# Altium footprint library Package_DFN_QFN.PcbLib: 735 footprints (part 14 of 46)
Each footprint in its own frame and in the unit in brackets; x right, y up, seen from the top. Pads: shape width x height; smd on the part's side, far side on the other; paste and mask are expansions set on the pad; w line width, h text height; cw(c..) or ccw(c..) is an arc to the next point about the centre after c.
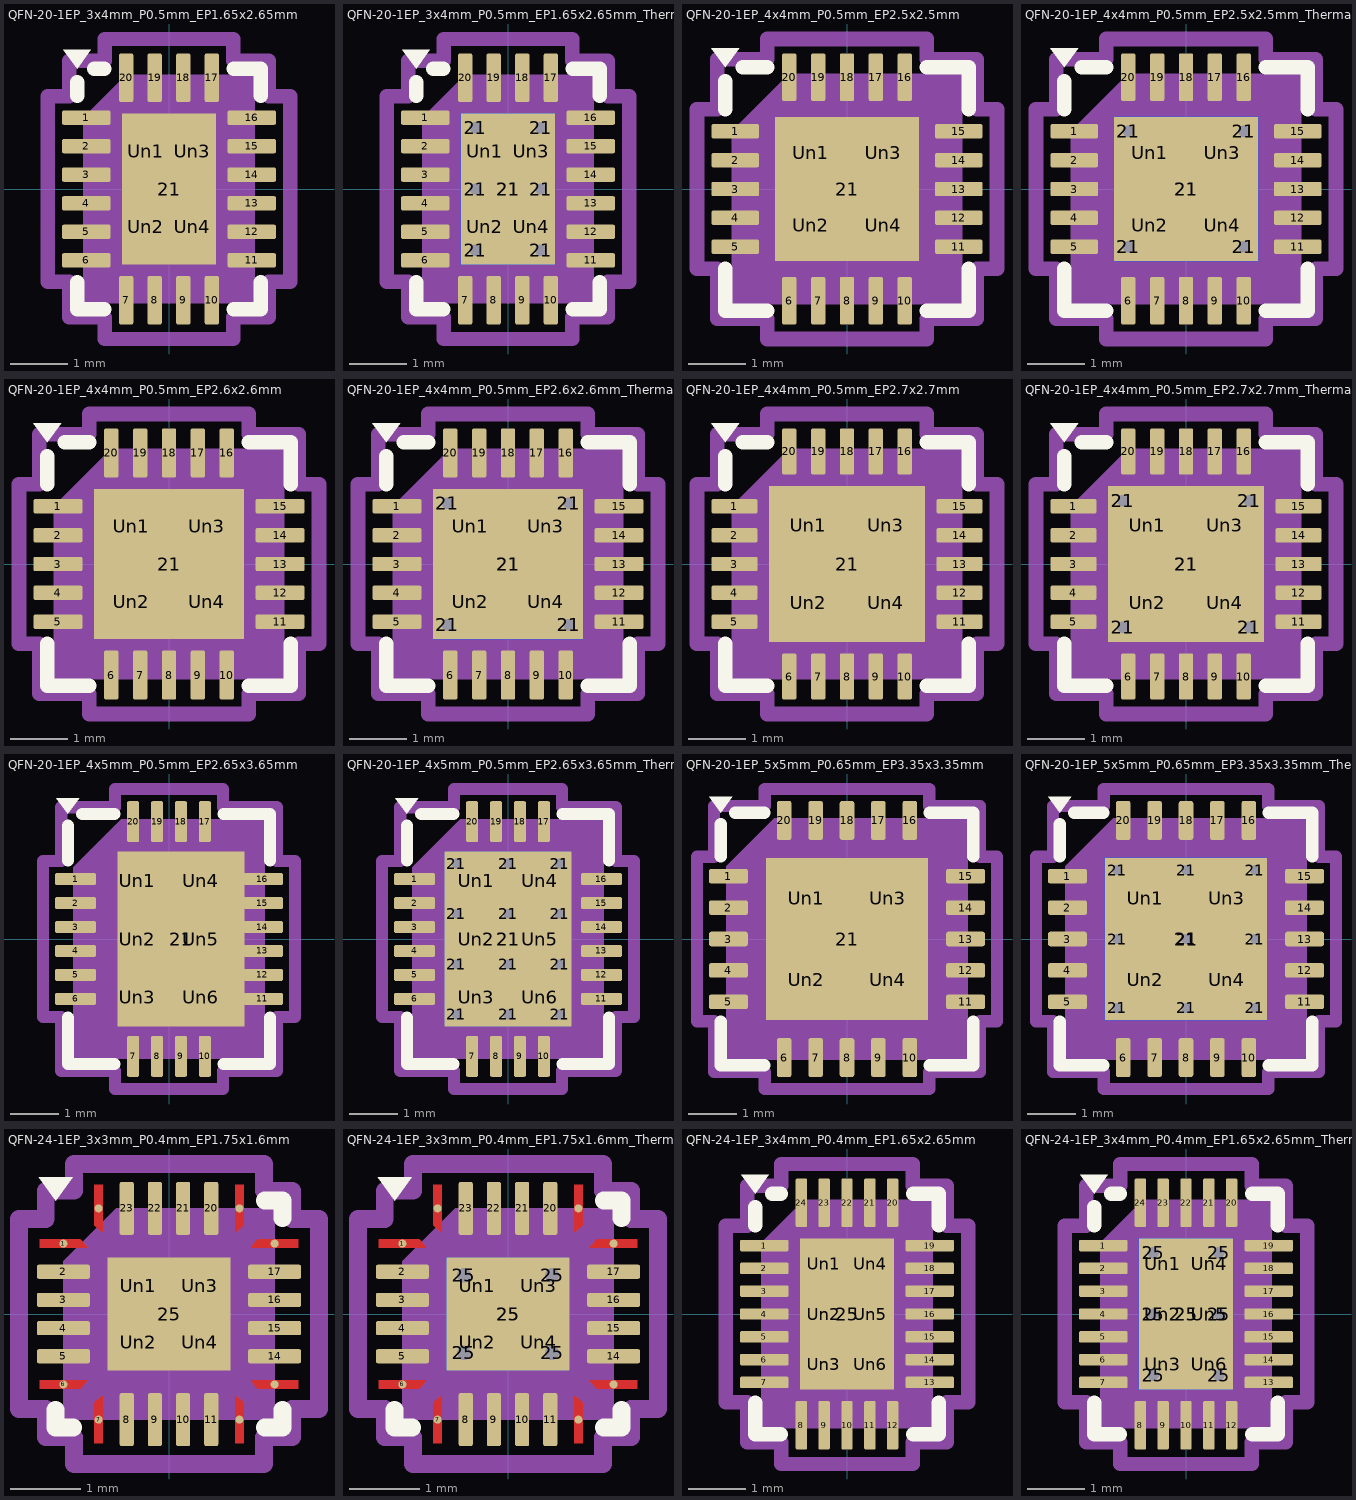
[diagram p13: the footprints below, top view; thin cyan lines are the x and y axes]

## QFN-20-1EP_3x4mm_P0.5mm_EP1.65x2.65mm [mm] "QFN-20-1EP_3x4mm_P0.5mm_EP1.65x2.65mm"
pads (25):
  rrect25% 0.85x0.25 smd: 1(-1.45,1.25) 2(-1.45,0.75) 3(-1.45,0.25) 4(-1.45,-0.25) 5(-1.45,-0.75) 6(-1.45,-1.25) 11(1.45,-1.25) 12(1.45,-0.75) 13(1.45,-0.25) 14(1.45,0.25) 15(1.45,0.75) 16(1.45,1.25)
  rrect25% 0.25x0.85 smd: 7(-0.75,-1.95) 8(-0.25,-1.95) 9(0.25,-1.95) 10(0.75,-1.95) 17(0.75,1.95) 18(0.25,1.95) 19(-0.25,1.95) 20(-0.75,1.95)
  rect 1.65x2.65 smd: 21(0,0)
  rrect25% 0.67x1.07 on Top Paste: Un1(-0.41,0.66) Un2(-0.41,-0.66) Un3(0.41,0.66) Un4(0.41,-0.66)
F.SilkS:
  region: -1.61,2.11 -1.85,2.44 -1.37,2.44
  lines w0.254: -1.61,-1.635 -1.61,-2.11 -1.135,-2.11 ; -1.61,1.635 -1.61,1.87 ; -1.31,2.11 -1.135,2.11 ; 1.135,-2.11 1.61,-2.11 1.61,-1.635 ; 1.135,2.11 1.61,2.11 1.61,1.635
Top Component Center:
  lines w0.127: -0.127,0 0.127,0 -0.127,0 ; 0,-0.127 0,0.127 0,-0.127
Top Assembly:
  region: 1.5,-2 -1.5,-2 -1.5,1.25 -0.75,2 1.5,2
Top Courtyard:
  lines w0.254: -2.13,-1.63 -1.75,-1.63 -1.75,-2.25 -1.13,-2.25 -1.13,-2.63 1.13,-2.63 1.13,-2.25 1.75,-2.25 1.75,-1.63 2.13,-1.63 2.13,1.63 1.75,1.63 1.75,2.25 1.13,2.25 1.13,2.63 -1.13,2.63 -1.13,2.25 -1.75,2.25 -1.75,1.63 -2.13,1.63 -2.13,-1.63
Top Designator:
  text ".Designator" at -3.43,-0.344 h1.52
3D body "QFN-20-1EP_3x4mm_P0.5mm_EP1.65x2.65mm.step": height 0.77, standoff 0, extent -1.5,-2 1.5,2

## QFN-20-1EP_3x4mm_P0.5mm_EP1.65x2.65mm_ThermalVias [mm] "QFN-20-1EP_3x4mm_P0.5mm_EP1.65x2.65mm_ThermalVias"
pads (32):
  rrect25% 0.85x0.25 smd: 1(-1.45,1.25) 2(-1.45,0.75) 3(-1.45,0.25) 4(-1.45,-0.25) 5(-1.45,-0.75) 6(-1.45,-1.25) 11(1.45,-1.25) 12(1.45,-0.75) 13(1.45,-0.25) 14(1.45,0.25) 15(1.45,0.75) 16(1.45,1.25)
  rrect25% 0.25x0.85 smd: 7(-0.75,-1.95) 8(-0.25,-1.95) 9(0.25,-1.95) 10(0.75,-1.95) 17(0.75,1.95) 18(0.25,1.95) 19(-0.25,1.95) 20(-0.75,1.95)
  round 0.5 hole 0.2: 21(-0.575,-1.075) 21(-0.575,0) 21(-0.575,1.075) 21(0.575,-1.075) 21(0.575,0) 21(0.575,1.075)
  rect 1.65x2.65 smd: 21(0,0)
  rect 1.65x2.65 smd far side: 21(0,0)
  rrect25% 0.71x1.15 on Top Paste: Un1(-0.41,0.66) Un2(-0.41,-0.66) Un3(0.41,0.66) Un4(0.41,-0.66)
F.SilkS:
  region: -1.61,2.11 -1.85,2.44 -1.37,2.44
  lines w0.254: -1.61,-1.635 -1.61,-2.11 -1.135,-2.11 ; -1.61,1.635 -1.61,1.87 ; -1.31,2.11 -1.135,2.11 ; 1.135,-2.11 1.61,-2.11 1.61,-1.635 ; 1.135,2.11 1.61,2.11 1.61,1.635
Top Component Center:
  lines w0.127: -0.127,0 0.127,0 -0.127,0 ; 0,-0.127 0,0.127 0,-0.127
Top Assembly:
  region: 1.5,-2 -1.5,-2 -1.5,1.25 -0.75,2 1.5,2
Top Courtyard:
  lines w0.254: -2.13,-1.63 -2.13,1.63 -1.75,1.63 -1.75,2.25 -1.13,2.25 -1.13,2.63 1.13,2.63 1.13,2.25 1.75,2.25 1.75,1.63 2.13,1.63 2.13,-1.63 1.75,-1.63 1.75,-2.25 1.13,-2.25 1.13,-2.63 -1.13,-2.63 -1.13,-2.25 -1.75,-2.25 -1.75,-1.63 -2.13,-1.63
Top Designator:
  text ".Designator" at -3.43,-0.344 h1.52

## QFN-20-1EP_4x4mm_P0.5mm_EP2.5x2.5mm [mm] "QFN-20-1EP_4x4mm_P0.5mm_EP2.5x2.5mm"
pads (25):
  rrect25% 0.825x0.25 smd: 1(-1.937,1) 2(-1.937,0.5) 3(-1.937,0) 4(-1.937,-0.5) 5(-1.937,-1) 11(1.937,-1) 12(1.937,-0.5) 13(1.937,0) 14(1.937,0.5) 15(1.937,1)
  rrect25% 0.25x0.825 smd: 6(-1,-1.937) 7(-0.5,-1.937) 8(0,-1.937) 9(0.5,-1.937) 10(1,-1.937) 16(1,1.937) 17(0.5,1.937) 18(0,1.937) 19(-0.5,1.937) 20(-1,1.937)
  rect 2.5x2.5 smd: 21(0,0)
  rrect25% 1.01x1.01 on Top Paste: Un1(-0.625,0.625) Un2(-0.625,-0.625) Un3(0.625,0.625) Un4(0.625,-0.625)
F.SilkS:
  region: -2.11,2.11 -2.35,2.44 -1.87,2.44
  lines w0.254: -2.11,-1.385 -2.11,-2.11 -1.385,-2.11 ; -2.11,1.385 -2.11,1.87 ; -1.81,2.11 -1.385,2.11 ; 1.385,-2.11 2.11,-2.11 2.11,-1.385 ; 1.385,2.11 2.11,2.11 2.11,1.385
Top Component Center:
  lines w0.127: -0.127,0 0.127,0 -0.127,0 ; 0,-0.127 0,0.127 0,-0.127
Top Assembly:
  region: 2,-2 -2,-2 -2,1 -1,2 2,2
Top Courtyard:
  lines w0.254: -2.6,-1.38 -2.25,-1.38 -2.25,-2.25 -1.38,-2.25 -1.38,-2.6 1.38,-2.6 1.38,-2.25 2.25,-2.25 2.25,-1.38 2.6,-1.38 2.6,1.38 2.25,1.38 2.25,2.25 1.38,2.25 1.38,2.6 -1.38,2.6 -1.38,2.25 -2.25,2.25 -2.25,1.38 -2.6,1.38 -2.6,-1.38
Top Designator:
  text ".Designator" at -3.43,-0.344 h1.52

## QFN-20-1EP_4x4mm_P0.5mm_EP2.5x2.5mm_ThermalVias [mm] "QFN-20-1EP_4x4mm_P0.5mm_EP2.5x2.5mm_ThermalVias"
pads (30):
  rrect25% 0.825x0.25 smd: 1(-1.937,1) 2(-1.937,0.5) 3(-1.937,0) 4(-1.937,-0.5) 5(-1.937,-1) 11(1.937,-1) 12(1.937,-0.5) 13(1.937,0) 14(1.937,0.5) 15(1.937,1)
  rrect25% 0.25x0.825 smd: 6(-1,-1.937) 7(-0.5,-1.937) 8(0,-1.937) 9(0.5,-1.937) 10(1,-1.937) 16(1,1.937) 17(0.5,1.937) 18(0,1.937) 19(-0.5,1.937) 20(-1,1.937)
  round 0.5 hole 0.2: 21(-1,-1) 21(-1,1) 21(1,-1) 21(1,1)
  rect 2.5x2.5 smd: 21(0,0)
  rect 2.5x2.5 smd far side: 21(0,0)
  rrect23% 1.08x1.08 on Top Paste: Un1(-0.625,0.625) Un2(-0.625,-0.625) Un3(0.625,0.625) Un4(0.625,-0.625)
F.SilkS:
  region: -2.11,2.11 -2.35,2.44 -1.87,2.44
  lines w0.254: -2.11,-1.385 -2.11,-2.11 -1.385,-2.11 ; -2.11,1.385 -2.11,1.87 ; -1.81,2.11 -1.385,2.11 ; 1.385,-2.11 2.11,-2.11 2.11,-1.385 ; 1.385,2.11 2.11,2.11 2.11,1.385
Top Component Center:
  lines w0.127: -0.127,0 0.127,0 -0.127,0 ; 0,-0.127 0,0.127 0,-0.127
Top Assembly:
  region: 2,-2 -2,-2 -2,1 -1,2 2,2
Top Courtyard:
  lines w0.254: -2.6,-1.38 -2.6,1.38 -2.25,1.38 -2.25,2.25 -1.38,2.25 -1.38,2.6 1.38,2.6 1.38,2.25 2.25,2.25 2.25,1.38 2.6,1.38 2.6,-1.38 2.25,-1.38 2.25,-2.25 1.38,-2.25 1.38,-2.6 -1.38,-2.6 -1.38,-2.25 -2.25,-2.25 -2.25,-1.38 -2.6,-1.38
Top Designator:
  text ".Designator" at -3.43,-0.344 h1.52

## QFN-20-1EP_4x4mm_P0.5mm_EP2.6x2.6mm [mm] "QFN-20-1EP_4x4mm_P0.5mm_EP2.6x2.6mm"
pads (25):
  rrect25% 0.85x0.25 smd: 1(-1.925,1) 2(-1.925,0.5) 3(-1.925,0) 4(-1.925,-0.5) 5(-1.925,-1) 11(1.925,-1) 12(1.925,-0.5) 13(1.925,0) 14(1.925,0.5) 15(1.925,1)
  rrect25% 0.25x0.85 smd: 6(-1,-1.925) 7(-0.5,-1.925) 8(0,-1.925) 9(0.5,-1.925) 10(1,-1.925) 16(1,1.925) 17(0.5,1.925) 18(0,1.925) 19(-0.5,1.925) 20(-1,1.925)
  rect 2.6x2.6 smd: 21(0,0)
  rrect24% 1.05x1.05 on Top Paste: Un1(-0.65,0.65) Un2(-0.65,-0.65) Un3(0.65,0.65) Un4(0.65,-0.65)
F.SilkS:
  region: -2.11,2.11 -2.35,2.44 -1.87,2.44
  lines w0.254: -2.11,-1.385 -2.11,-2.11 -1.385,-2.11 ; -2.11,1.385 -2.11,1.87 ; -1.81,2.11 -1.385,2.11 ; 1.385,-2.11 2.11,-2.11 2.11,-1.385 ; 1.385,2.11 2.11,2.11 2.11,1.385
Top Component Center:
  lines w0.127: -0.127,0 0.127,0 -0.127,0 ; 0,-0.127 0,0.127 0,-0.127
Top Assembly:
  region: 2,-2 -2,-2 -2,1 -1,2 2,2
Top Courtyard:
  lines w0.254: -2.6,-1.38 -2.25,-1.38 -2.25,-2.25 -1.38,-2.25 -1.38,-2.6 1.38,-2.6 1.38,-2.25 2.25,-2.25 2.25,-1.38 2.6,-1.38 2.6,1.38 2.25,1.38 2.25,2.25 1.38,2.25 1.38,2.6 -1.38,2.6 -1.38,2.25 -2.25,2.25 -2.25,1.38 -2.6,1.38 -2.6,-1.38
Top Designator:
  text ".Designator" at -3.43,-0.344 h1.52
3D body "QFN-20-1EP_4x4mm_P0.5mm_EP2.5x2.5mm.step": height 0.77, standoff 0, extent -2,-2 2,2

## QFN-20-1EP_4x4mm_P0.5mm_EP2.6x2.6mm_ThermalVias [mm] "QFN-20-1EP_4x4mm_P0.5mm_EP2.6x2.6mm_ThermalVias"
pads (30):
  rrect25% 0.85x0.25 smd: 1(-1.925,1) 2(-1.925,0.5) 3(-1.925,0) 4(-1.925,-0.5) 5(-1.925,-1) 11(1.925,-1) 12(1.925,-0.5) 13(1.925,0) 14(1.925,0.5) 15(1.925,1)
  rrect25% 0.25x0.85 smd: 6(-1,-1.925) 7(-0.5,-1.925) 8(0,-1.925) 9(0.5,-1.925) 10(1,-1.925) 16(1,1.925) 17(0.5,1.925) 18(0,1.925) 19(-0.5,1.925) 20(-1,1.925)
  round 0.5 hole 0.2: 21(-1.05,-1.05) 21(-1.05,1.05) 21(1.05,-1.05) 21(1.05,1.05)
  rect 2.6x2.6 smd: 21(0,0)
  rect 2.6x2.6 smd far side: 21(0,0)
  rrect22% 1.13x1.13 on Top Paste: Un1(-0.65,0.65) Un2(-0.65,-0.65) Un3(0.65,0.65) Un4(0.65,-0.65)
F.SilkS:
  region: -2.11,2.11 -2.35,2.44 -1.87,2.44
  lines w0.254: -2.11,-1.385 -2.11,-2.11 -1.385,-2.11 ; -2.11,1.385 -2.11,1.87 ; -1.81,2.11 -1.385,2.11 ; 1.385,-2.11 2.11,-2.11 2.11,-1.385 ; 1.385,2.11 2.11,2.11 2.11,1.385
Top Component Center:
  lines w0.127: -0.127,0 0.127,0 -0.127,0 ; 0,-0.127 0,0.127 0,-0.127
Top Assembly:
  region: 2,-2 -2,-2 -2,1 -1,2 2,2
Top Courtyard:
  lines w0.254: -2.6,-1.38 -2.25,-1.38 -2.25,-2.25 -1.38,-2.25 -1.38,-2.6 1.38,-2.6 1.38,-2.25 2.25,-2.25 2.25,-1.38 2.6,-1.38 2.6,1.38 2.25,1.38 2.25,2.25 1.38,2.25 1.38,2.6 -1.38,2.6 -1.38,2.25 -2.25,2.25 -2.25,1.38 -2.6,1.38 -2.6,-1.38
Top Designator:
  text ".Designator" at -3.43,-0.344 h1.52
3D body "QFN-20-1EP_4x4mm_P0.5mm_EP2.5x2.5mm.step": height 0.77, standoff 0, extent -2,-2 2,2

## QFN-20-1EP_4x4mm_P0.5mm_EP2.7x2.7mm [mm] "QFN-20-1EP_4x4mm_P0.5mm_EP2.7x2.7mm"
pads (25):
  rrect25% 0.8x0.25 smd: 1(-1.95,1) 2(-1.95,0.5) 3(-1.95,0) 4(-1.95,-0.5) 5(-1.95,-1) 11(1.95,-1) 12(1.95,-0.5) 13(1.95,0) 14(1.95,0.5) 15(1.95,1)
  rrect25% 0.25x0.8 smd: 6(-1,-1.95) 7(-0.5,-1.95) 8(0,-1.95) 9(0.5,-1.95) 10(1,-1.95) 16(1,1.95) 17(0.5,1.95) 18(0,1.95) 19(-0.5,1.95) 20(-1,1.95)
  rect 2.7x2.7 smd: 21(0,0)
  rrect23% 1.09x1.09 on Top Paste: Un1(-0.675,0.675) Un2(-0.675,-0.675) Un3(0.675,0.675) Un4(0.675,-0.675)
F.SilkS:
  region: -2.11,2.11 -2.35,2.44 -1.87,2.44
  lines w0.254: -2.11,-1.385 -2.11,-2.11 -1.385,-2.11 ; -2.11,1.385 -2.11,1.87 ; -1.81,2.11 -1.385,2.11 ; 1.385,-2.11 2.11,-2.11 2.11,-1.385 ; 1.385,2.11 2.11,2.11 2.11,1.385
Top Component Center:
  lines w0.127: -0.127,0 0.127,0 -0.127,0 ; 0,-0.127 0,0.127 0,-0.127
Top Assembly:
  region: 2,-2 -2,-2 -2,1 -1,2 2,2
Top Courtyard:
  lines w0.254: -2.6,-1.38 -2.25,-1.38 -2.25,-2.25 -1.38,-2.25 -1.38,-2.6 1.38,-2.6 1.38,-2.25 2.25,-2.25 2.25,-1.38 2.6,-1.38 2.6,1.38 2.25,1.38 2.25,2.25 1.38,2.25 1.38,2.6 -1.38,2.6 -1.38,2.25 -2.25,2.25 -2.25,1.38 -2.6,1.38 -2.6,-1.38
Top Designator:
  text ".Designator" at -3.43,-0.344 h1.52
3D body "QFN-20-1EP_4x4mm_P0.5mm_EP2.5x2.5mm.step": height 0.77, standoff 0, extent -2,-2 2,2

## QFN-20-1EP_4x4mm_P0.5mm_EP2.7x2.7mm_ThermalVias [mm] "QFN-20-1EP_4x4mm_P0.5mm_EP2.7x2.7mm_ThermalVias"
pads (30):
  rrect25% 0.8x0.25 smd: 1(-1.95,1) 2(-1.95,0.5) 3(-1.95,0) 4(-1.95,-0.5) 5(-1.95,-1) 11(1.95,-1) 12(1.95,-0.5) 13(1.95,0) 14(1.95,0.5) 15(1.95,1)
  rrect25% 0.25x0.8 smd: 6(-1,-1.95) 7(-0.5,-1.95) 8(0,-1.95) 9(0.5,-1.95) 10(1,-1.95) 16(1,1.95) 17(0.5,1.95) 18(0,1.95) 19(-0.5,1.95) 20(-1,1.95)
  round 0.5 hole 0.2: 21(-1.1,-1.1) 21(-1.1,1.1) 21(1.1,-1.1) 21(1.1,1.1)
  rect 2.7x2.7 smd: 21(0,0)
  rect 2.7x2.7 smd far side: 21(0,0)
  rrect21% 1.17x1.17 on Top Paste: Un1(-0.675,0.675) Un2(-0.675,-0.675) Un3(0.675,0.675) Un4(0.675,-0.675)
F.SilkS:
  region: -2.11,2.11 -2.35,2.44 -1.87,2.44
  lines w0.254: -2.11,-1.385 -2.11,-2.11 -1.385,-2.11 ; -2.11,1.385 -2.11,1.87 ; -1.81,2.11 -1.385,2.11 ; 1.385,-2.11 2.11,-2.11 2.11,-1.385 ; 1.385,2.11 2.11,2.11 2.11,1.385
Top Component Center:
  lines w0.127: -0.127,0 0.127,0 -0.127,0 ; 0,-0.127 0,0.127 0,-0.127
Top Assembly:
  region: 2,-2 -2,-2 -2,1 -1,2 2,2
Top Courtyard:
  lines w0.254: -2.6,-1.38 -2.25,-1.38 -2.25,-2.25 -1.38,-2.25 -1.38,-2.6 1.38,-2.6 1.38,-2.25 2.25,-2.25 2.25,-1.38 2.6,-1.38 2.6,1.38 2.25,1.38 2.25,2.25 1.38,2.25 1.38,2.6 -1.38,2.6 -1.38,2.25 -2.25,2.25 -2.25,1.38 -2.6,1.38 -2.6,-1.38
Top Designator:
  text ".Designator" at -3.43,-0.344 h1.52
3D body "QFN-20-1EP_4x4mm_P0.5mm_EP2.5x2.5mm.step": height 0.77, standoff 0, extent -2,-2 2,2

## QFN-20-1EP_4x5mm_P0.5mm_EP2.65x3.65mm [mm] "QFN-20-1EP_4x5mm_P0.5mm_EP2.65x3.65mm"
pads (27):
  rrect25% 0.85x0.25 smd: 1(-1.95,1.25) 2(-1.95,0.75) 3(-1.95,0.25) 4(-1.95,-0.25) 5(-1.95,-0.75) 6(-1.95,-1.25) 11(1.95,-1.25) 12(1.95,-0.75) 13(1.95,-0.25) 14(1.95,0.25) 15(1.95,0.75) 16(1.95,1.25)
  rrect25% 0.25x0.85 smd: 7(-0.75,-2.45) 8(-0.25,-2.45) 9(0.25,-2.45) 10(0.75,-2.45) 17(0.75,2.45) 18(0.25,2.45) 19(-0.25,2.45) 20(-0.75,2.45)
  rect 2.65x3.65 smd: 21(0.254,0)
  rrect25% 1.07x0.98 on Top Paste: Un1(-0.66,1.22) Un2(-0.66,0) Un3(-0.66,-1.22) Un4(0.66,1.22) Un5(0.66,0) Un6(0.66,-1.22)
F.SilkS:
  region: -2.11,2.61 -2.35,2.94 -1.87,2.94
  lines w0.254: -2.11,-1.635 -2.11,-2.61 -1.135,-2.61 ; -2.11,1.635 -2.11,2.37 ; -1.81,2.61 -1.135,2.61 ; 1.135,-2.61 2.11,-2.61 2.11,-1.635 ; 1.135,2.61 2.11,2.61 2.11,1.635
Top Component Center:
  lines w0.127: -0.127,0 0.127,0 -0.127,0 ; 0,-0.127 0,0.127 0,-0.127
Top Assembly:
  region: 2,-2.5 -2,-2.5 -2,1.5 -1,2.5 2,2.5
Top Courtyard:
  lines w0.254: -2.63,-1.63 -2.25,-1.63 -2.25,-2.75 -1.13,-2.75 -1.13,-3.13 1.13,-3.13 1.13,-2.75 2.25,-2.75 2.25,-1.63 2.63,-1.63 2.63,1.63 2.25,1.63 2.25,2.75 1.13,2.75 1.13,3.13 -1.13,3.13 -1.13,2.75 -2.25,2.75 -2.25,1.63 -2.63,1.63 -2.63,-1.63
Top Designator:
  text ".Designator" at -3.43,-0.344 h1.52
3D body "QFN-20-1EP_4x5mm_P0.5mm_EP2.65x3.65mm.step": height 0.77, standoff 0, extent -2,-2.5 2,2.5

## QFN-20-1EP_4x5mm_P0.5mm_EP2.65x3.65mm_ThermalVias [mm] "QFN-20-1EP_4x5mm_P0.5mm_EP2.65x3.65mm_ThermalVias"
pads (40):
  rrect25% 0.85x0.25 smd: 1(-1.95,1.25) 2(-1.95,0.75) 3(-1.95,0.25) 4(-1.95,-0.25) 5(-1.95,-0.75) 6(-1.95,-1.25) 11(1.95,-1.25) 12(1.95,-0.75) 13(1.95,-0.25) 14(1.95,0.25) 15(1.95,0.75) 16(1.95,1.25)
  rrect25% 0.25x0.85 smd: 7(-0.75,-2.45) 8(-0.25,-2.45) 9(0.25,-2.45) 10(0.75,-2.45) 17(0.75,2.45) 18(0.25,2.45) 19(-0.25,2.45) 20(-0.75,2.45)
  round 0.5 hole 0.2: 21(-1.075,-1.575) 21(-1.075,-0.525) 21(-1.075,0.525) 21(-1.075,1.575) 21(0,-1.575) 21(0,-0.525) 21(0,0.525) 21(0,1.575) 21(1.075,-1.575) 21(1.075,-0.525) 21(1.075,0.525) 21(1.075,1.575)
  rect 2.65x3.65 smd: 21(0,0)
  rect 2.65x3.65 smd far side: 21(0,0)
  rrect25% 0.98x0.9 on Top Paste: Un1(-0.66,1.22) Un2(-0.66,0) Un3(-0.66,-1.22) Un4(0.66,1.22) Un5(0.66,0) Un6(0.66,-1.22)
F.SilkS:
  region: -2.11,2.61 -2.35,2.94 -1.87,2.94
  lines w0.254: -2.11,-1.635 -2.11,-2.61 -1.135,-2.61 ; -2.11,1.635 -2.11,2.37 ; -1.81,2.61 -1.135,2.61 ; 1.135,-2.61 2.11,-2.61 2.11,-1.635 ; 1.135,2.61 2.11,2.61 2.11,1.635
Top Component Center:
  lines w0.127: -0.127,0 0.127,0 -0.127,0 ; 0,-0.127 0,0.127 0,-0.127
Top Assembly:
  region: 2,-2.5 -2,-2.5 -2,1.5 -1,2.5 2,2.5
Top Courtyard:
  lines w0.254: -2.63,-1.63 -2.25,-1.63 -2.25,-2.75 -1.13,-2.75 -1.13,-3.13 1.13,-3.13 1.13,-2.75 2.25,-2.75 2.25,-1.63 2.63,-1.63 2.63,1.63 2.25,1.63 2.25,2.75 1.13,2.75 1.13,3.13 -1.13,3.13 -1.13,2.75 -2.25,2.75 -2.25,1.63 -2.63,1.63 -2.63,-1.63
Top Designator:
  text ".Designator" at -3.43,-0.344 h1.52
3D body "QFN-20-1EP_4x5mm_P0.5mm_EP2.65x3.65mm.step": height 0.77, standoff 0, extent -2,-2.5 2,2.5

## QFN-20-1EP_5x5mm_P0.65mm_EP3.35x3.35mm [mm] "QFN-20-1EP_5x5mm_P0.65mm_EP3.35x3.35mm"
pads (25):
  rrect25% 0.8x0.3 smd: 1(-2.45,1.3) 2(-2.45,0.65) 3(-2.45,0) 4(-2.45,-0.65) 5(-2.45,-1.3) 11(2.45,-1.3) 12(2.45,-0.65) 13(2.45,0) 14(2.45,0.65) 15(2.45,1.3)
  rrect25% 0.3x0.8 smd: 6(-1.3,-2.45) 7(-0.65,-2.45) 8(0,-2.45) 9(0.65,-2.45) 10(1.3,-2.45) 16(1.3,2.45) 17(0.65,2.45) 18(0,2.45) 19(-0.65,2.45) 20(-1.3,2.45)
  rect 3.35x3.35 smd: 21(0,0)
  rrect19% 1.35x1.35 on Top Paste: Un1(-0.84,0.84) Un2(-0.84,-0.84) Un3(0.84,0.84) Un4(0.84,-0.84)
F.SilkS:
  region: -2.61,2.61 -2.85,2.94 -2.37,2.94
  lines w0.254: -2.61,-1.71 -2.61,-2.61 -1.71,-2.61 ; -2.61,1.71 -2.61,2.37 ; -2.31,2.61 -1.71,2.61 ; 1.71,-2.61 2.61,-2.61 2.61,-1.71 ; 1.71,2.61 2.61,2.61 2.61,1.71
Top Component Center:
  lines w0.127: -0.127,0 0.127,0 -0.127,0 ; 0,-0.127 0,0.127 0,-0.127
Top Assembly:
  region: 2.5,-2.5 -2.5,-2.5 -2.5,1.5 -1.5,2.5 2.5,2.5
Top Courtyard:
  lines w0.254: -3.1,-1.7 -2.75,-1.7 -2.75,-2.75 -1.7,-2.75 -1.7,-3.1 1.7,-3.1 1.7,-2.75 2.75,-2.75 2.75,-1.7 3.1,-1.7 3.1,1.7 2.75,1.7 2.75,2.75 1.7,2.75 1.7,3.1 -1.7,3.1 -1.7,2.75 -2.75,2.75 -2.75,1.7 -3.1,1.7 -3.1,-1.7
Top Designator:
  text ".Designator" at -3.43,-0.344 h1.52
3D body "QFN-20-1EP_5x5mm_P0.65mm_EP3.35x3.35mm.step": height 0.77, standoff 0, extent -2.5,-2.5 2.5,2.5

## QFN-20-1EP_5x5mm_P0.65mm_EP3.35x3.35mm_ThermalVias [mm] "QFN-20-1EP_5x5mm_P0.65mm_EP3.35x3.35mm_ThermalVias"
pads (35):
  rrect25% 0.8x0.3 smd: 1(-2.45,1.3) 2(-2.45,0.65) 3(-2.45,0) 4(-2.45,-0.65) 5(-2.45,-1.3) 11(2.45,-1.3) 12(2.45,-0.65) 13(2.45,0) 14(2.45,0.65) 15(2.45,1.3)
  rrect25% 0.3x0.8 smd: 6(-1.3,-2.45) 7(-0.65,-2.45) 8(0,-2.45) 9(0.65,-2.45) 10(1.3,-2.45) 16(1.3,2.45) 17(0.65,2.45) 18(0,2.45) 19(-0.65,2.45) 20(-1.3,2.45)
  round 0.5 hole 0.2: 21(-1.425,-1.425) 21(-1.425,0) 21(-1.425,1.425) 21(0,-1.425) 21(0,0) 21(0,1.425) 21(1.425,-1.425) 21(1.425,0) 21(1.425,1.425)
  rect 3.35x3.35 smd: 21(0,0)
  rect 3.35x3.35 smd far side: 21(0,0)
  rrect17% 1.45x1.45 on Top Paste: Un1(-0.84,0.84) Un2(-0.84,-0.84) Un3(0.84,0.84) Un4(0.84,-0.84)
F.SilkS:
  region: -2.61,2.61 -2.85,2.94 -2.37,2.94
  lines w0.254: -2.61,-1.71 -2.61,-2.61 -1.71,-2.61 ; -2.61,1.71 -2.61,2.37 ; -2.31,2.61 -1.71,2.61 ; 1.71,-2.61 2.61,-2.61 2.61,-1.71 ; 1.71,2.61 2.61,2.61 2.61,1.71
Top Component Center:
  lines w0.127: -0.127,0 0.127,0 -0.127,0 ; 0,-0.127 0,0.127 0,-0.127
Top Assembly:
  region: 2.5,-2.5 -2.5,-2.5 -2.5,1.5 -1.5,2.5 2.5,2.5
Top Courtyard:
  lines w0.254: -3.1,-1.7 -2.75,-1.7 -2.75,-2.75 -1.7,-2.75 -1.7,-3.1 1.7,-3.1 1.7,-2.75 2.75,-2.75 2.75,-1.7 3.1,-1.7 3.1,1.7 2.75,1.7 2.75,2.75 1.7,2.75 1.7,3.1 -1.7,3.1 -1.7,2.75 -2.75,2.75 -2.75,1.7 -3.1,1.7 -3.1,-1.7
Top Designator:
  text ".Designator" at -3.43,-0.344 h1.52
3D body "QFN-20-1EP_5x5mm_P0.65mm_EP3.35x3.35mm.step": height 0.77, standoff 0, extent -2.5,-2.5 2.5,2.5

## QFN-24-1EP_3x3mm_P0.4mm_EP1.75x1.6mm [mm] "QFN-24-1EP_3x3mm_P0.4mm_EP1.75x1.6mm"
pads (29):
  round 0.115 smd: 1(-1.5,1) 6(-1.5,-1) 7(-1,-1.5) 12(1,-1.5) 13(1.5,-1) 18(1.5,1) 19(1,1.5) 24(-1,1.5)
  rrect25% 0.75x0.2 smd: 2(-1.5,0.6) 3(-1.5,0.2) 4(-1.5,-0.2) 5(-1.5,-0.6) 14(1.5,-0.6) 15(1.5,-0.2) 16(1.5,0.2) 17(1.5,0.6)
  rrect25% 0.2x0.75 smd: 8(-0.6,-1.5) 9(-0.2,-1.5) 10(0.2,-1.5) 11(0.6,-1.5) 20(0.6,1.5) 21(0.2,1.5) 22(-0.2,1.5) 23(-0.6,1.5)
  rect 1.75x1.6 smd: 25(0,0)
  rrect25% 0.71x0.64 on Top Paste: Un1(-0.44,0.4) Un2(-0.44,-0.4) Un3(0.44,0.4) Un4(0.44,-0.4)
F.Cu:
  region: -0.94,1.165 -0.963,1.165 -1.06,1.262 -1.06,1.835 -0.94,1.835
  region: 1.06,1.262 0.963,1.165 0.94,1.165 0.94,1.835 1.06,1.835
  region: 1.835,0.94 1.165,0.94 1.165,0.963 1.262,1.06 1.835,1.06
  region: 1.835,-1.06 1.262,-1.06 1.165,-0.963 1.165,-0.94 1.835,-0.94
  region: 1.06,-1.262 1.06,-1.835 0.94,-1.835 0.94,-1.165 0.963,-1.165
  region: -0.94,-1.835 -1.06,-1.835 -1.06,-1.262 -0.963,-1.165 -0.94,-1.165
  region: -1.165,-0.963 -1.262,-1.06 -1.835,-1.06 -1.835,-0.94 -1.165,-0.94
  region: -1.165,0.963 -1.165,0.94 -1.835,0.94 -1.835,1.06 -1.262,1.06
F.SilkS:
  region: -1.61,1.61 -1.85,1.94 -1.37,1.94
  lines w0.254: -1.61,-1.36 -1.61,-1.61 -1.36,-1.61 ; 1.36,-1.61 1.61,-1.61 1.61,-1.36 ; 1.36,1.61 1.61,1.61 1.61,1.36
F.Paste:
  region: -0.94,1.165 -0.963,1.165 -1.06,1.262 -1.06,1.835 -0.94,1.835
  region: 1.06,1.262 0.963,1.165 0.94,1.165 0.94,1.835 1.06,1.835
  region: 1.835,0.94 1.165,0.94 1.165,0.963 1.262,1.06 1.835,1.06
  region: 1.835,-1.06 1.262,-1.06 1.165,-0.963 1.165,-0.94 1.835,-0.94
  region: 1.06,-1.262 1.06,-1.835 0.94,-1.835 0.94,-1.165 0.963,-1.165
  region: -0.94,-1.835 -1.06,-1.835 -1.06,-1.262 -0.963,-1.165 -0.94,-1.165
  region: -1.165,-0.963 -1.262,-1.06 -1.835,-1.06 -1.835,-0.94 -1.165,-0.94
  region: -1.165,0.963 -1.165,0.94 -1.835,0.94 -1.835,1.06 -1.262,1.06
F.Mask:
  region: -0.94,1.165 -0.963,1.165 -1.06,1.262 -1.06,1.835 -0.94,1.835
  region: 1.06,1.262 0.963,1.165 0.94,1.165 0.94,1.835 1.06,1.835
  region: 1.835,0.94 1.165,0.94 1.165,0.963 1.262,1.06 1.835,1.06
  region: 1.835,-1.06 1.262,-1.06 1.165,-0.963 1.165,-0.94 1.835,-0.94
  region: 1.06,-1.262 1.06,-1.835 0.94,-1.835 0.94,-1.165 0.963,-1.165
  region: -0.94,-1.835 -1.06,-1.835 -1.06,-1.262 -0.963,-1.165 -0.94,-1.165
  region: -1.165,-0.963 -1.262,-1.06 -1.835,-1.06 -1.835,-0.94 -1.165,-0.94
  region: -1.165,0.963 -1.165,0.94 -1.835,0.94 -1.835,1.06 -1.262,1.06
Top Component Center:
  lines w0.127: -0.127,0 0.127,0 -0.127,0 ; 0,-0.127 0,0.127 0,-0.127
Top Assembly:
  region: 1.5,-1.5 -1.5,-1.5 -1.5,0.75 -0.75,1.5 1.5,1.5
Top Courtyard:
  lines w0.254: -2.13,-1.35 -1.75,-1.35 -1.75,-1.75 -1.35,-1.75 -1.35,-2.13 1.35,-2.13 1.35,-1.75 1.75,-1.75 1.75,-1.35 2.13,-1.35 2.13,1.35 1.75,1.35 1.75,1.75 1.35,1.75 1.35,2.13 -1.35,2.13 -1.35,1.75 -1.75,1.75 -1.75,1.35 -2.13,1.35 -2.13,-1.35
Top Designator:
  text ".Designator" at -3.43,-0.344 h1.52
3D body "QFN-24-1EP_3x3mm_P0.4mm_EP1.75x1.6mm.step": height 1.02, standoff 0, extent -1.5,-1.5 1.5,1.5

## QFN-24-1EP_3x3mm_P0.4mm_EP1.75x1.6mm_ThermalVias [mm] "QFN-24-1EP_3x3mm_P0.4mm_EP1.75x1.6mm_ThermalVias"
pads (34):
  round 0.115 smd: 1(-1.5,1) 6(-1.5,-1) 7(-1,-1.5) 12(1,-1.5) 13(1.5,-1) 18(1.5,1) 19(1,1.5) 24(-1,1.5)
  rrect25% 0.75x0.2 smd: 2(-1.5,0.6) 3(-1.5,0.2) 4(-1.5,-0.2) 5(-1.5,-0.6) 14(1.5,-0.6) 15(1.5,-0.2) 16(1.5,0.2) 17(1.5,0.6)
  rrect25% 0.2x0.75 smd: 8(-0.6,-1.5) 9(-0.2,-1.5) 10(0.2,-1.5) 11(0.6,-1.5) 20(0.6,1.5) 21(0.2,1.5) 22(-0.2,1.5) 23(-0.6,1.5)
  round 0.5 hole 0.2: 25(-0.625,-0.55) 25(-0.625,0.55) 25(0.625,-0.55) 25(0.625,0.55)
  rect 1.75x1.6 smd: 25(0,0)
  rect 1.75x1.6 smd far side: 25(0,0)
  rrect25% 0.76x0.69 on Top Paste: Un1(-0.44,0.4) Un2(-0.44,-0.4) Un3(0.44,0.4) Un4(0.44,-0.4)
F.Cu:
  region: -1.165,0.963 -1.165,0.94 -1.835,0.94 -1.835,1.06 -1.262,1.06
  region: -1.165,-0.963 -1.262,-1.06 -1.835,-1.06 -1.835,-0.94 -1.165,-0.94
  region: -0.94,-1.835 -1.06,-1.835 -1.06,-1.262 -0.963,-1.165 -0.94,-1.165
  region: 1.06,-1.262 1.06,-1.835 0.94,-1.835 0.94,-1.165 0.963,-1.165
  region: 1.835,-1.06 1.262,-1.06 1.165,-0.963 1.165,-0.94 1.835,-0.94
  region: 1.835,0.94 1.165,0.94 1.165,0.963 1.262,1.06 1.835,1.06
  region: 1.06,1.262 0.963,1.165 0.94,1.165 0.94,1.835 1.06,1.835
  region: -0.94,1.165 -0.963,1.165 -1.06,1.262 -1.06,1.835 -0.94,1.835
F.SilkS:
  region: -1.61,1.61 -1.85,1.94 -1.37,1.94
  lines w0.254: -1.61,-1.36 -1.61,-1.61 -1.36,-1.61 ; 1.36,-1.61 1.61,-1.61 1.61,-1.36 ; 1.36,1.61 1.61,1.61 1.61,1.36
F.Paste:
  region: -1.165,0.963 -1.165,0.94 -1.835,0.94 -1.835,1.06 -1.262,1.06
  region: -1.165,-0.963 -1.262,-1.06 -1.835,-1.06 -1.835,-0.94 -1.165,-0.94
  region: -0.94,-1.835 -1.06,-1.835 -1.06,-1.262 -0.963,-1.165 -0.94,-1.165
  region: 1.06,-1.262 1.06,-1.835 0.94,-1.835 0.94,-1.165 0.963,-1.165
  region: 1.835,-1.06 1.262,-1.06 1.165,-0.963 1.165,-0.94 1.835,-0.94
  region: 1.835,0.94 1.165,0.94 1.165,0.963 1.262,1.06 1.835,1.06
  region: 1.06,1.262 0.963,1.165 0.94,1.165 0.94,1.835 1.06,1.835
  region: -0.94,1.165 -0.963,1.165 -1.06,1.262 -1.06,1.835 -0.94,1.835
F.Mask:
  region: -1.165,0.963 -1.165,0.94 -1.835,0.94 -1.835,1.06 -1.262,1.06
  region: -1.165,-0.963 -1.262,-1.06 -1.835,-1.06 -1.835,-0.94 -1.165,-0.94
  region: -0.94,-1.835 -1.06,-1.835 -1.06,-1.262 -0.963,-1.165 -0.94,-1.165
  region: 1.06,-1.262 1.06,-1.835 0.94,-1.835 0.94,-1.165 0.963,-1.165
  region: 1.835,-1.06 1.262,-1.06 1.165,-0.963 1.165,-0.94 1.835,-0.94
  region: 1.835,0.94 1.165,0.94 1.165,0.963 1.262,1.06 1.835,1.06
  region: 1.06,1.262 0.963,1.165 0.94,1.165 0.94,1.835 1.06,1.835
  region: -0.94,1.165 -0.963,1.165 -1.06,1.262 -1.06,1.835 -0.94,1.835
Top Component Center:
  lines w0.127: -0.127,0 0.127,0 -0.127,0 ; 0,-0.127 0,0.127 0,-0.127
Top Assembly:
  region: 1.5,-1.5 -1.5,-1.5 -1.5,0.75 -0.75,1.5 1.5,1.5
Top Courtyard:
  lines w0.254: -2.13,-1.35 -2.13,1.35 -1.75,1.35 -1.75,1.75 -1.35,1.75 -1.35,2.13 1.35,2.13 1.35,1.75 1.75,1.75 1.75,1.35 2.13,1.35 2.13,-1.35 1.75,-1.35 1.75,-1.75 1.35,-1.75 1.35,-2.13 -1.35,-2.13 -1.35,-1.75 -1.75,-1.75 -1.75,-1.35 -2.13,-1.35
Top Designator:
  text ".Designator" at -3.43,-0.344 h1.52
3D body "QFN-24-1EP_3x3mm_P0.4mm_EP1.75x1.6mm.step": height 1.02, standoff 0, extent -1.5,-1.5 1.5,1.5

## QFN-24-1EP_3x4mm_P0.4mm_EP1.65x2.65mm [mm] "QFN-24-1EP_3x4mm_P0.4mm_EP1.65x2.65mm"
pads (31):
  rrect25% 0.85x0.2 smd: 1(-1.45,1.2) 2(-1.45,0.8) 3(-1.45,0.4) 4(-1.45,0) 5(-1.45,-0.4) 6(-1.45,-0.8) 7(-1.45,-1.2) 13(1.45,-1.2) 14(1.45,-0.8) 15(1.45,-0.4) 16(1.45,0) 17(1.45,0.4) 18(1.45,0.8) 19(1.45,1.2)
  rrect25% 0.2x0.85 smd: 8(-0.8,-1.95) 9(-0.4,-1.95) 10(0,-1.95) 11(0.4,-1.95) 12(0.8,-1.95) 20(0.8,1.95) 21(0.4,1.95) 22(0,1.95) 23(-0.4,1.95) 24(-0.8,1.95)
  rect 1.65x2.65 smd: 25(0,0)
  rrect25% 0.67x0.71 on Top Paste: Un1(-0.41,0.88) Un2(-0.41,0) Un3(-0.41,-0.88) Un4(0.41,0.88) Un5(0.41,0) Un6(0.41,-0.88)
F.SilkS:
  region: -1.61,2.11 -1.85,2.44 -1.37,2.44
  lines w0.254: -1.61,-1.56 -1.61,-2.11 -1.16,-2.11 ; -1.61,1.56 -1.61,1.87 ; -1.31,2.11 -1.16,2.11 ; 1.16,-2.11 1.61,-2.11 1.61,-1.56 ; 1.16,2.11 1.61,2.11 1.61,1.56
Top Component Center:
  lines w0.127: -0.127,0 0.127,0 -0.127,0 ; 0,-0.127 0,0.127 0,-0.127
Top Assembly:
  region: 1.5,-2 -1.5,-2 -1.5,1.25 -0.75,2 1.5,2
Top Courtyard:
  lines w0.254: -2.13,-1.55 -1.75,-1.55 -1.75,-2.25 -1.15,-2.25 -1.15,-2.63 1.15,-2.63 1.15,-2.25 1.75,-2.25 1.75,-1.55 2.13,-1.55 2.13,1.55 1.75,1.55 1.75,2.25 1.15,2.25 1.15,2.63 -1.15,2.63 -1.15,2.25 -1.75,2.25 -1.75,1.55 -2.13,1.55 -2.13,-1.55
Top Designator:
  text ".Designator" at -3.43,-0.344 h1.52

## QFN-24-1EP_3x4mm_P0.4mm_EP1.65x2.65mm_ThermalVias [mm] "QFN-24-1EP_3x4mm_P0.4mm_EP1.65x2.65mm_ThermalVias"
pads (38):
  rrect25% 0.85x0.2 smd: 1(-1.45,1.2) 2(-1.45,0.8) 3(-1.45,0.4) 4(-1.45,0) 5(-1.45,-0.4) 6(-1.45,-0.8) 7(-1.45,-1.2) 13(1.45,-1.2) 14(1.45,-0.8) 15(1.45,-0.4) 16(1.45,0) 17(1.45,0.4) 18(1.45,0.8) 19(1.45,1.2)
  rrect25% 0.2x0.85 smd: 8(-0.8,-1.95) 9(-0.4,-1.95) 10(0,-1.95) 11(0.4,-1.95) 12(0.8,-1.95) 20(0.8,1.95) 21(0.4,1.95) 22(0,1.95) 23(-0.4,1.95) 24(-0.8,1.95)
  round 0.5 hole 0.2: 25(-0.575,-1.075) 25(-0.575,0) 25(-0.575,1.075) 25(0.575,-1.075) 25(0.575,0) 25(0.575,1.075)
  rect 1.65x2.65 smd: 25(0,0)
  rect 1.65x2.65 smd far side: 25(0,0)
  rrect25% 0.71x0.76 on Top Paste: Un1(-0.41,0.88) Un2(-0.41,0) Un3(-0.41,-0.88) Un4(0.41,0.88) Un5(0.41,0) Un6(0.41,-0.88)
F.SilkS:
  region: -1.61,2.11 -1.85,2.44 -1.37,2.44
  lines w0.254: -1.61,-1.56 -1.61,-2.11 -1.16,-2.11 ; -1.61,1.56 -1.61,1.87 ; -1.31,2.11 -1.16,2.11 ; 1.16,-2.11 1.61,-2.11 1.61,-1.56 ; 1.16,2.11 1.61,2.11 1.61,1.56
Top Component Center:
  lines w0.127: -0.127,0 0.127,0 -0.127,0 ; 0,-0.127 0,0.127 0,-0.127
Top Assembly:
  region: 1.5,-2 -1.5,-2 -1.5,1.25 -0.75,2 1.5,2
Top Courtyard:
  lines w0.254: -2.13,-1.55 -2.13,1.55 -1.75,1.55 -1.75,2.25 -1.15,2.25 -1.15,2.63 1.15,2.63 1.15,2.25 1.75,2.25 1.75,1.55 2.13,1.55 2.13,-1.55 1.75,-1.55 1.75,-2.25 1.15,-2.25 1.15,-2.63 -1.15,-2.63 -1.15,-2.25 -1.75,-2.25 -1.75,-1.55 -2.13,-1.55
Top Designator:
  text ".Designator" at -3.43,-0.344 h1.52
3D body "QFN-24-1EP_3x4mm_P0.4mm_EP1.65x2.65mm.step": height 0.77, standoff 0, extent -1.5,-2 1.5,2